# Altium footprint library Connector_FPC.PcbLib: 36 footprints (part 3 of 3)
Each footprint in its own frame and in the unit in brackets; x right, y up, seen from the top. Pads: shape width x height; smd on the part's side, far side on the other; paste and mask are expansions set on the pad; w line width, h text height; cw(c..) or ccw(c..) is an arc to the next point about the centre after c.
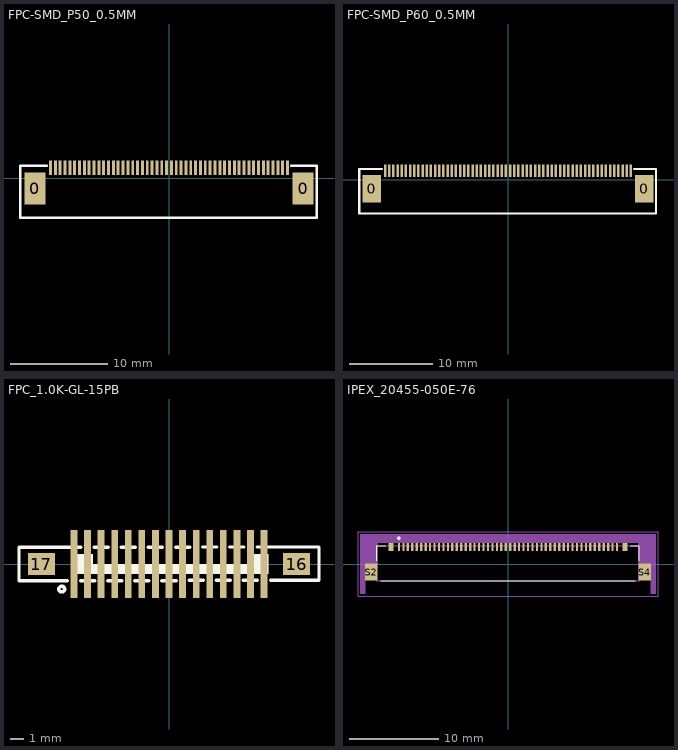
[diagram p2: the footprints below, top view; thin cyan lines are the x and y axes]

## FPC-SMD_P50_0.5MM [mm]
pads (52):
  rect 2.2x3.3 smd: 0(-13.852,-1.084) 0(13.852,-1.084)
  rect 0.3x1.5 smd: 1(-12.25,1.084) 2(-11.75,1.084) 3(-11.25,1.084) 4(-10.75,1.084) 5(-10.25,1.084) 6(-9.75,1.084) 7(-9.25,1.084) 8(-8.75,1.084) 9(-8.25,1.084) 10(-7.75,1.084) 11(-7.25,1.084) 12(-6.75,1.084) 13(-6.25,1.084) 14(-5.748,1.083) 15(-5.25,1.084) 16(-4.75,1.084) 17(-4.25,1.084) 18(-3.75,1.084) 19(-3.25,1.084) 20(-2.75,1.084) 21(-2.25,1.084) 22(-1.75,1.084) 23(-1.25,1.084) 24(-0.75,1.084) 25(-0.25,1.084) 26(0.25,1.084) 27(0.75,1.084) 28(1.25,1.084) 29(1.75,1.084) 30(2.25,1.084) 31(2.75,1.084) 32(3.25,1.084) 33(3.75,1.084) 34(4.25,1.084) 35(4.75,1.084) 36(5.25,1.084) 37(5.75,1.084) 38(6.25,1.084) 39(6.75,1.084) 40(7.25,1.084) 41(7.75,1.084) 42(8.25,1.084) 43(8.75,1.084) 44(9.25,1.084) 45(9.75,1.084) 46(10.25,1.084) 47(10.75,1.084) 48(11.25,1.084) 49(11.75,1.084) 50(12.25,1.084)
Top Overlay:
  lines w0.254: -12.631,1.286 -15.351,1.286 -15.351,-4.064 15.249,-4.064 15.249,1.286 12.631,1.286
3D body "54132-5062.stp": height 2, standoff -0.05, extent -15.25,-5.25 15.25,1.9

## FPC-SMD_P60_0.5MM [mm]
pads (62):
  rect 2.2x3.3 smd: 0(-16.352,-1.084) 0(16.352,-1.084)
  rect 0.3x1.5 smd: 1(-14.75,1.084) 2(-14.25,1.084) 3(-13.75,1.084) 4(-13.25,1.084) 5(-12.75,1.084) 6(-12.25,1.084) 7(-11.75,1.084) 8(-11.25,1.084) 9(-10.75,1.084) 10(-10.25,1.084) 11(-9.75,1.084) 12(-9.25,1.084) 13(-8.75,1.084) 14(-8.248,1.083) 15(-7.75,1.084) 16(-7.25,1.084) 17(-6.75,1.084) 18(-6.25,1.084) 19(-5.75,1.084) 20(-5.25,1.084) 21(-4.75,1.084) 22(-4.25,1.084) 23(-3.75,1.084) 24(-3.25,1.084) 25(-2.75,1.084) 26(-2.25,1.084) 27(-1.75,1.084) 28(-1.25,1.084) 29(-0.75,1.084) 30(-0.25,1.084) 31(0.25,1.084) 32(0.75,1.084) 33(1.25,1.084) 34(1.75,1.084) 35(2.25,1.084) 36(2.75,1.084) 37(3.25,1.084) 38(3.75,1.084) 39(4.25,1.084) 40(4.75,1.084) 41(5.25,1.084) 42(5.75,1.084) 43(6.25,1.084) 44(6.75,1.084) 45(7.25,1.084) 46(7.75,1.084) 47(8.25,1.084) 48(8.75,1.084) 49(9.25,1.084) 50(9.75,1.084) 51(10.25,1.084) 52(10.75,1.084) 53(11.25,1.084) 54(11.75,1.084) 55(12.25,1.084) 56(12.75,1.084) 57(13.25,1.084) 58(13.75,1.084) 59(14.25,1.084) 60(14.75,1.084)
Top Overlay:
  lines w0.254: -15.131,1.286 -17.851,1.286 -17.851,-4.064 17.749,-4.064 17.749,1.286 15.131,1.286

## FPC_1.0K-GL-15PB [mm]
pads (17):
  rect 0.5x5 smd: 1(-7,0) 2(-6,0) 3(-5,0) 4(-4,0) 5(-3,0) 6(-2,0) 7(-1,0) 8(0,0) 9(1,0) 10(2,0) 11(3,0) 12(4,0) 13(5,0) 14(6,0) 15(7,0)
  rect 2x1.6 smd: 16(9.4,0) 17(-9.4,0)
Top Overlay:
  circle w0.254: c-7.9,-1.85 r0.212
  region: 7.3,-0.7 -6.9,-0.7 -6.9,0.7 -5.6,0.7 -5.6,0 6,0 6,0.7 7.3,0.7 7.3,0.3
  lines w0.254: -7.481,-1.25 -11.05,-1.25 -11.05,1.25 -6.481,1.25 ; -6.519,-1.25 -5.481,-1.25 ; -5.519,1.25 -4.481,1.25 ; -4.519,-1.25 -3.481,-1.25 ; -3.519,1.25 -2.481,1.25 ; -2.519,-1.25 -1.481,-1.25 ; -1.519,1.25 -0.481,1.25 ; -0.519,-1.25 0.519,-1.25 ; 0.481,1.25 1.519,1.25 ; 1.5,-1.2 2.519,-1.2 ; 2.481,1.251 3.519,1.251 ; 3.481,-1.2 4.519,-1.2 ; 4.481,1.251 5.519,1.251 ; 5.481,-1.2 6.519,-1.2 ; 6.481,1.251 11.05,1.251 11.05,-1.2 7.481,-1.2
Mechanical 15:
  region: 7.3,-0.7 -6.9,-0.7 -6.9,0.7 -5.6,0.7 -5.6,0 6,0 6,0.7 7.3,0.7 7.3,0.3
3D body "FPC1.stp": height 5.4, standoff 0, extent -11,-2.25 11,2.25

## IPEX_20455-050E-76 [mm]
pads (54):
  rect 0.25x0.9 smd: 1(-12.25,1.92) 2(-11.75,1.92) 3(-11.25,1.92) 4(-10.75,1.92) 5(-10.25,1.92) 6(-9.75,1.92) 7(-9.25,1.92) 8(-8.75,1.92) 9(-8.25,1.92) 10(-7.75,1.92) 11(-7.25,1.92) 12(-6.75,1.92) 13(-6.25,1.92) 14(-5.75,1.92) 15(-5.25,1.92) 16(-4.75,1.92) 17(-4.25,1.92) 18(-3.75,1.92) 19(-3.25,1.92) 20(-2.75,1.92) 21(-2.25,1.92) 22(-1.75,1.92) 23(-1.25,1.92) 24(-0.75,1.92) 25(-0.25,1.92) 26(0.25,1.92) 27(0.75,1.92) 28(1.25,1.92) 29(1.75,1.92) 30(2.25,1.92) 31(2.75,1.92) 32(3.25,1.92) 33(3.75,1.92) 34(4.25,1.92) 35(4.75,1.92) 36(5.25,1.92) 37(5.75,1.92) 38(6.25,1.92) 39(6.75,1.92) 40(7.25,1.92) 41(7.75,1.92) 42(8.25,1.92) 43(8.75,1.92) 44(9.25,1.92) 45(9.75,1.92) 46(10.25,1.92) 47(10.75,1.92) 48(11.25,1.92) 49(11.75,1.92) 50(12.25,1.92)
  rect 0.55x0.9 smd: S1(-13.15,1.92) S3(13.15,1.92)
  rect 1.4x1.9 smd: S2(-15.35,-0.9) S4(15.35,-0.9)
Top Overlay:
  circle w0.2: c-12.25,2.9 r0.1
  lines w0.127: -14.735,0.37 -14.735,2.05 -13.75,2.05 ; -14.3,-1.9 14.3,-1.9 ; 13.75,2.05 14.735,2.05 14.735,0.37
Mechanical 13:
  circle w0.2: c-12.25,2.9 r0.1
  lines w0.127: -14.735,-1.9 -14.735,2.05 14.735,2.05 14.735,-1.9 -14.735,-1.9
Mechanical 15:
  region: 16.6,-3.35 16.05,-3.35 16.05,0.05 14.65,0.05 14.65,2.37 -14.65,2.37 -14.65,0.05 -16.05,0.05 -16.05,-3.35 -16.6,-3.35 -16.6,3.35 16.6,3.35
  lines w0.05: -16.85,-3.6 16.85,-3.6 16.85,3.6 -16.85,3.6 -16.85,-3.6
3D body "20453-x50T-x2SC+20455-050E-xx_MATING_STEP_R8R6_ALL.STEP": height 0.98, standoff -0.02, extent -15.625,-17.156 15.625,2